# Altium footprint library cp-01.PcbLib: 47 footprints (part 3 of 3)
Each footprint in its own frame and in the unit in brackets; x right, y up, seen from the top. Pads: shape width x height; smd on the part's side, far side on the other; paste and mask are expansions set on the pad; w line width, h text height; cw(c..) or ccw(c..) is an arc to the next point about the centre after c.
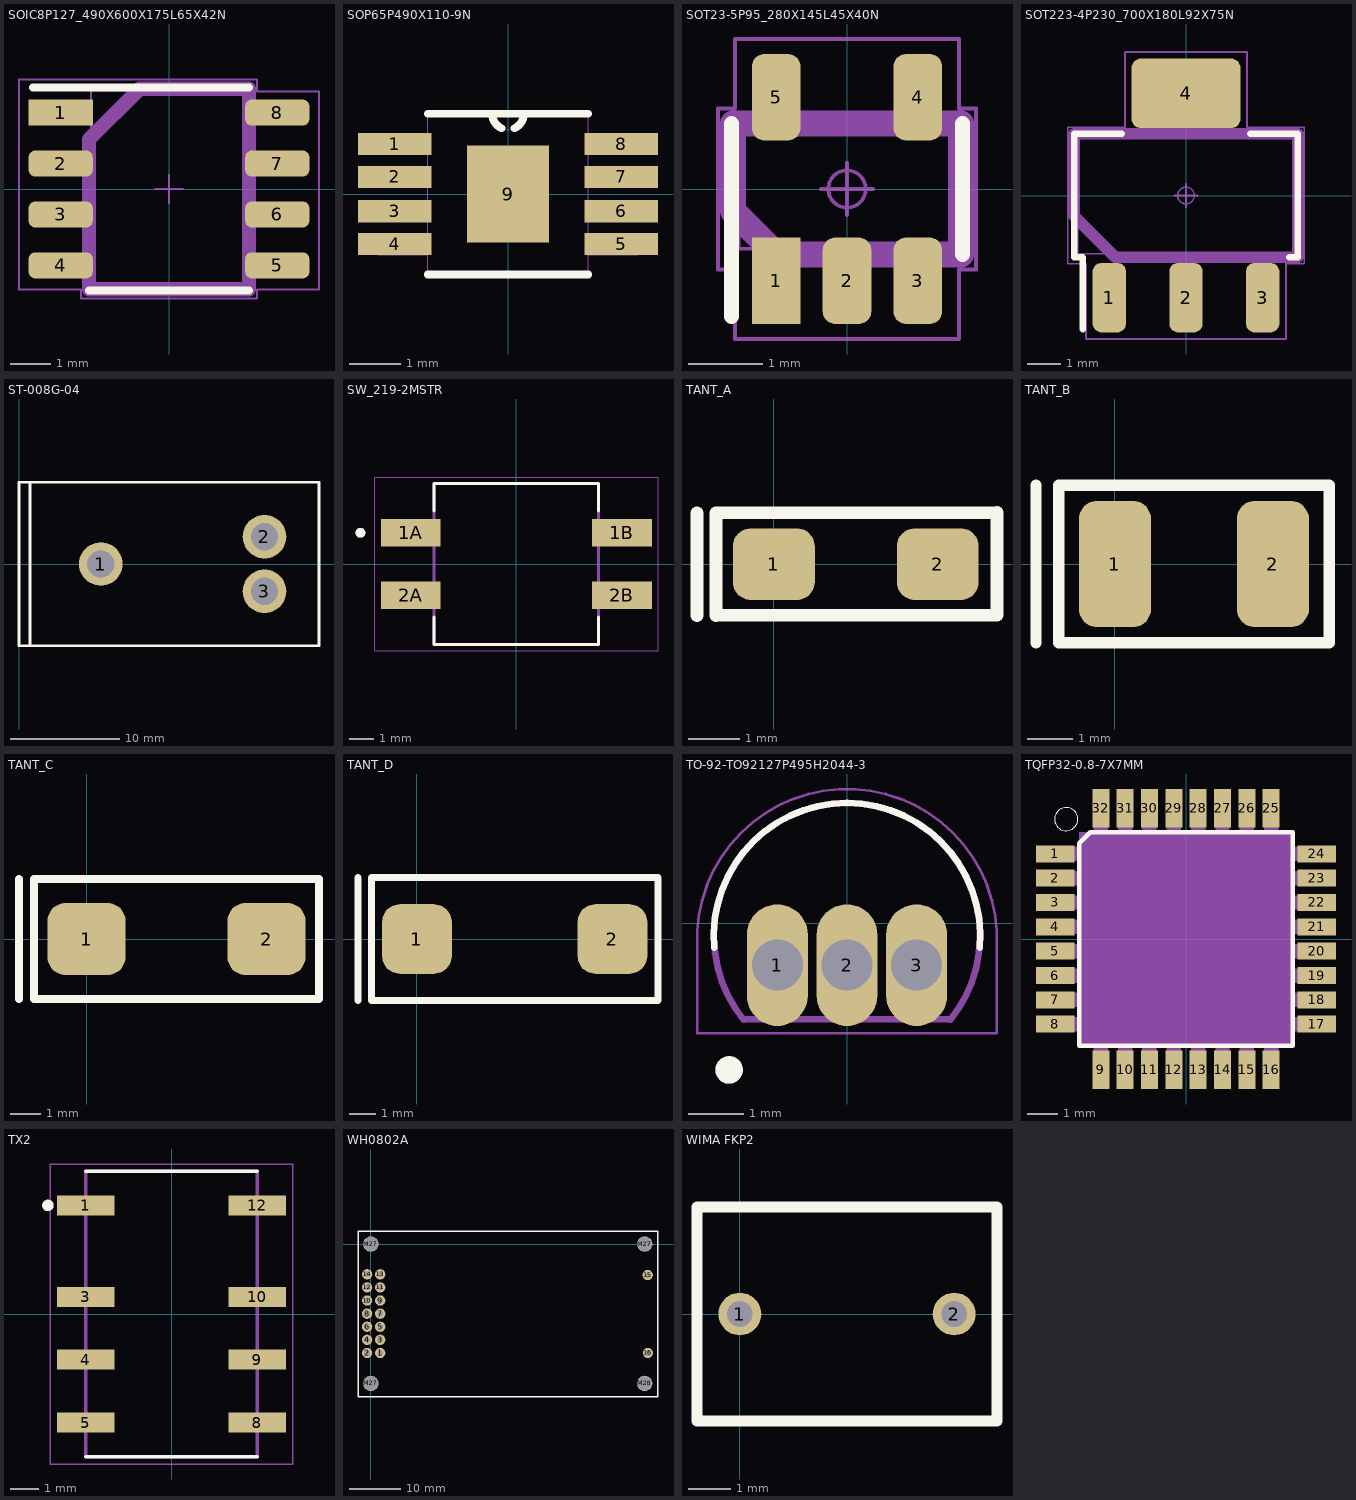
[diagram p2: the footprints below, top view; thin cyan lines are the x and y axes]

## SOIC8P127_490X600X175L65X42N [mm] "Small Outline IC (SOIC), 1.27 mm pitch; 8 pin, 4.905 mm L X 3.90 mm W X 1.75 mm H body"
height 1.75
pads (8):
  rect 1.6x0.65 smd: 1(-2.7,1.905)
  rrect49% 1.6x0.65 smd: 2(-2.7,0.635) 3(-2.7,-0.635) 4(-2.7,-1.905) 5(2.7,-1.905) 6(2.7,-0.635) 7(2.7,0.635) 8(2.7,1.905)
Top Overlay:
  lines w0.2: -3.39,2.53 -2,2.53 2,2.53 ; -2,-2.53 2,-2.53
Top Courtyard:
  lines w0.05: -0.35,0 0.35,0 ; 0,-0.35 0,0.35 ; -3.74,-2.5 -3.74,2.73 2.2,2.73 2.2,2.43 3.74,2.43 3.74,-2.5 2.2,-2.5 2.2,-2.73 -2.2,-2.73 -2.2,-2.5 -3.74,-2.5
Top Assembly:
  lines w0.35: -2,-2.5 -2,1.23 -0.73,2.5 2,2.5 2,-2.5 -2,-2.5
Top Component Outline:
  lines w0.05: -1.95,-2.452 -1.95,2.452 1.95,2.452 1.95,-2.452 -1.95,-2.452
Top Designator:
  text ".Designator" at 0,0 h1.2
Mechanical 25:
  lines w0.05: -3,-2.115 -2.165,-2.115 -2.165,-1.695 -3,-1.695 -3,-2.115 ; -3,-0.845 -2.165,-0.845 -2.165,-0.425 -3,-0.425 -3,-0.845 ; -3,0.425 -2.165,0.425 -2.165,0.845 -3,0.845 -3,0.425 ; -3,1.695 -2.165,1.695 -2.165,2.115 -3,2.115 -3,1.695 ; 2.165,-2.115 2.165,-1.695 3,-1.695 3,-2.115 2.165,-2.115 ; 2.165,-0.845 2.165,-0.425 3,-0.425 3,-0.845 2.165,-0.845 ; 2.165,0.425 2.165,0.845 3,0.845 3,0.425 2.165,0.425 ; 2.165,1.695 2.165,2.115 3,2.115 3,1.695 2.165,1.695
3D body "SOIC8P127_490X600X175L83X42.STEP": height 1.75, standoff 0, extent -3,-2.452 3,2.452

## SOP65P490X110-9N [mil]
pads (9):
  rect 56x17 smd: 1(-86,38) 2(-86,13) 3(-86,-13) 4(-86,-38) 5(86,-38) 6(86,-13) 7(86,13) 8(86,38)
  rect 62x74 smd: 9(0,0)
Top Overlay:
  lines w6: -61,-61 61,-61 ; -61,61 -12,61 ; -4.99,50 cw(c0.48,61.21) -12,60.99 ; 4.99,50 ccw(c-0.48,61.21) 12,60.99 ; 61,61 12,61 ; -12,61 12,61
Mechanical 13:
  lines w0: -12,61 ccw(c0,61) 12,61 ; -12,61 -61,61 -61,-61 61,-61 61,61 12,61 ; -12,61 12,61 ; -99,-46 -61,-46 -61,-31 -99,-31 -99,-46 ; -99,-20 -61,-20 -61,-5 -99,-5 -99,-20 ; -99,5 -61,5 -61,20 -99,20 -99,5 ; -99,31 -61,31 -61,46 -99,46 -99,31 ; 61,-46 99,-46 99,-31 61,-31 61,-46 ; 61,-20 99,-20 99,-5 61,-5 61,-20 ; 61,5 99,5 99,20 61,20 61,5 ; 61,31 99,31 99,46 61,46 61,31

## SOT23-5P95_280X145L45X40N [mm] "Small Outline Transistor (SOT23), 0.95 mm pitch; 5 pin, 2.90 mm L X 1.60 mm W X 1.45 mm H body"
height 1.45
pads (5):
  rect 0.65x1.16 smd: 1(-0.95,-1.23)
  rrect51% 0.65x1.16 smd: 2(0,-1.23) 3(0.95,-1.23) 4(0.95,1.23) 5(-0.95,1.23)
Top Overlay:
  lines w0.2: -1.55,-1.71 -1.55,-0.88 -1.55,0.88 ; 1.55,-0.88 1.55,0.88
Top Courtyard:
  circle w0.05: c0,0 r0.25
  lines w0.05: -0.35,0 0.35,0 ; 0,-0.35 0,0.35 ; -1.73,-1.08 -1.5,-1.08 -1.5,-2.01 1.5,-2.01 1.5,-1.08 1.73,-1.08 1.73,1.08 1.5,1.08 1.5,2.01 -1.5,2.01 -1.5,1.08 -1.73,1.08 -1.73,-1.08
Top Assembly:
  lines w0.35: -1.53,-0.293 -1.53,0.88 1.53,0.88 1.53,-0.88 -0.943,-0.88 -1.53,-0.293
Top Component Outline:
  lines w0.05: -1.45,-0.8 1.45,-0.8 1.45,0.8 -1.45,0.8 -1.45,-0.8
Top Designator:
  text ".Designator" at 0,0 h1.2
Mechanical 25:
  lines w0.05: -1.15,-1.4 -1.15,-0.95 -0.75,-0.95 -0.75,-1.4 -1.15,-1.4 ; -1.15,0.95 -1.15,1.4 -0.75,1.4 -0.75,0.95 -1.15,0.95 ; -0.2,-1.4 -0.2,-0.95 0.2,-0.95 0.2,-1.4 -0.2,-1.4 ; 0.75,-1.4 0.75,-0.95 1.15,-0.95 1.15,-1.4 0.75,-1.4 ; 0.75,0.95 0.75,1.4 1.15,1.4 1.15,0.95 0.75,0.95
3D body "SOT23-5P95_280X145L45X40.STEP": height 1.45, standoff 0, extent -1.45,-1.4 1.45,1.4

## SOT223-4P230_700X180L92X75N [mm] "Small Outline Transistor (SOT223), 2.30 mm pitch; 4 pin, 6.50 mm L X 3.50 mm W X 1.80 mm H body"
height 1.8
pads (4):
  rrect50% 1x2.08 smd: 1(-2.3,-3.065) 2(0,-3.065) 3(2.3,-3.065)
  rrect24% 3.26x2.08 smd: 4(0,3.065)
Top Overlay:
  lines w0.2: -3.1,-4.005 -3.1,-1.85 -3.35,-1.85 -3.35,1.85 -1.93,1.85 ; 1.93,1.85 3.35,1.85 3.35,-1.85 3.1,-1.85
Top Courtyard:
  circle w0.05: c0,0 r0.25
  lines w0.05: -0.35,0 0.35,0 ; 0,-0.35 0,0.35 ; -3.55,-2.05 -3.55,2.05 -1.83,2.05 -1.83,4.305 1.83,4.305 1.83,2.05 3.55,2.05 3.55,-2.05 3,-2.05 3,-4.305 -3,-4.305 -3,-2.05 -3.55,-2.05
Top Assembly:
  lines w0.35: -3.35,-0.617 -2.117,-1.85 3.35,-1.85 3.35,1.85 -3.35,1.85 -3.35,-0.617
Top Component Outline:
  lines w0.05: -3.25,-1.75 -3.25,1.75 3.25,1.75 3.25,-1.75 -3.25,-1.75
Top Designator:
  text ".Designator" at 0,0 h1.2
Mechanical 25:
  lines w0.05: -2.675,-3.5 -1.925,-3.5 -1.925,-2.575 -2.675,-2.575 -2.675,-3.5 ; -1.5,2.575 1.5,2.575 1.5,3.5 -1.5,3.5 -1.5,2.575 ; -0.375,-3.5 0.375,-3.5 0.375,-2.575 -0.375,-2.575 -0.375,-3.5 ; 1.925,-3.5 2.675,-3.5 2.675,-2.575 1.925,-2.575 1.925,-3.5
3D body "SOT223-4P230_700X180L92X75.STEP": height 1.8, standoff 0, extent -3.25,-3.5 3.25,3.5

## ST-008G-04 [mm]
pads (3):
  round 4 hole 2.5: 1(7.5,0) 2(22.5,2.5) 3(22.5,-2.5)
Top Overlay:
  lines w0.254: 1,-7.5 1,7.5 ; 0,-7.5 27.5,-7.5 27.5,7.5 0,7.5 0,0 0,-7.5

## SW_219-2MSTR [mm]
pads (4):
  rect 2.44x1.13 smd: 1A(-4.3,1.27) 1B(4.3,1.27) 2A(-4.3,-1.27) 2B(4.3,-1.27)
Top Overlay:
  circle w0.2: c-6.35,1.27 r0.1
  lines w0.127: -3.35,-2.155 -3.35,-3.275 3.35,-3.275 3.35,-2.155 ; -3.35,2.155 -3.35,3.275 3.35,3.275 3.35,2.155
Mechanical 13:
  circle w0.2: c-6.35,1.27 r0.1
  lines w0.127: -3.35,-3.275 3.35,-3.275 3.35,3.275 -3.35,3.275 -3.35,-3.275
Mechanical 15:
  lines w0.05: -5.77,-3.525 -5.77,3.525 5.77,3.525 5.77,-3.525 -5.77,-3.525
3D body "step_temp.STEP": height 4.58, standoff 0, extent -4.955,-3.275 4.955,3.275

## TANT_A [mm]
pads (2):
  rrect50% 1.6x1.4 smd: 1(0,0) 2(3.2,0)
Top Overlay:
  lines w0.254: -1.5,-1 -1.5,1 ; -1.125,-1 4.356,-0.992 4.356,1.008 -1.125,1 -1.125,-1
3D body "tant a.STEP": height 1.8, standoff 0, extent 0.075,-0.85 3.275,0.75

## TANT_B [mm]
pads (2):
  rrect50% 1.6x2.8 smd: 1(0,0) 2(3.5,0)
Top Overlay:
  lines w0.254: -1.75,-1.75 -1.75,1.75 ; -1.25,-1.75 -1.25,1.75 4.75,1.75 4.75,-1.75 -1.25,-1.75
3D body "tant b.STEP": height 2.1, standoff 0, extent 0,-1.3 3.5,1.5

## TANT_C [mm]
pads (2):
  rrect50% 2.6x2.4 smd: 1(0,0) 2(6,0)
Top Overlay:
  lines w0.254: -2.25,-2 -2.25,2 ; -1.75,-2 7.75,-2 7.75,2 -1.75,2 -1.75,-2
3D body "tant c.STEP": height 2.8, standoff 0, extent 0,-1.6 6,1.6

## TANT_D [mm]
pads (2):
  rrect50% 2.6x2.6 smd: 1(0,0) 2(7.3,0)
Top Overlay:
  lines w0.254: -2.2,-2.3 -2.2,2.3 ; -1.7,-2.3 -1.7,2.3 9,2.3 9,-2.3 -1.7,-2.3
3D body "tant d.STEP": height 3.1, standoff 0, extent -0.05,-2.2 7.25,2.1

## TO-92-TO92127P495H2044-3 [mm]
pads (3):
  oval 1.11x2.22 hole 0.93: 1(-1.27,-0.76) 2(0,-0.76) 3(1.27,-0.76)
Top Overlay:
  circle w0.25: c-2.15,-2.67 r0.125
  lines w0.12: -2.421,-0.444 cw(c0,-0.232) 2.421,-0.444
Mechanical 13:
  circle w0.25: c-2.15,-2.67 r0.125
  lines w0.12: -1.893,-1.748 1.892,-1.748 ; -1.886,-1.756 cw(c-0.001,-0.229) 1.885,-1.756
Mechanical 15:
  lines w0.05: -2.731,-0.426 cw(c0,-0.283) 2.731,-0.426 ; -2.73,-0.45 -2.73,-2 2.73,-2 2.73,-0.45
3D body "DS18B20--3DModel-STEP-56544.STEP": height 19.45, standoff -1, extent -2.26,-2.02 2.31,1.6

## TQFP32-0.8-7X7MM [mil]
pads (32):
  rect 50x22 smd: 1(-169,110.24) 2(-169,78.74) 3(-169,47.24) 4(-169,15.75) 5(-169,-15.75) 6(-169,-47.24) 7(-169,-78.74) 8(-169,-110.24) 17(169,-110.24) 18(169,-78.74) 19(169,-47.24) 20(169,-15.75) 21(169,15.75) 22(169,47.24) 23(169,78.74) 24(169,110.24)
  rect 22x50 smd: 9(-110.24,-169) 10(-78.74,-169) 11(-47.24,-169) 12(-15.75,-169) 13(15.75,-169) 14(47.24,-169) 15(78.74,-169) 16(110.24,-169) 25(110.24,169) 26(78.74,169) 27(47.24,169) 28(15.75,169) 29(-15.75,169) 30(-47.24,169) 31(-78.74,169) 32(-110.24,169)
Top Overlay:
  circle w0: c-155,155 r15
  lines w6: -137.99,-137.99 -137.99,124.02 -124.02,137.99 137.99,137.99 137.99,-137.99 -137.99,-137.99
Mechanical 13:
  region: -101.24,140.2 -119.4,140.2 -119.4,179 -101.24,179
  region: -69.74,140.07 -87.78,140.07 -87.78,179 -69.74,179
  region: -38.24,140.07 -56.27,140.07 -56.27,179 -38.24,179
  region: -6.75,140.19 -24.78,140.19 -24.78,179 -6.75,179
  region: 24.75,140.2 6.76,140.2 6.76,179 24.75,179
  region: 56.24,140.21 38.3,140.21 38.3,179 56.24,179
  region: 87.74,140.06 69.77,140.06 69.77,179 87.74,179
  region: 119.24,140.11 101.31,140.11 101.31,179 119.24,179
  region: 179,101.34 140.14,101.34 140.14,119.24 179,119.24
  region: 179,69.8 140.12,69.8 140.12,87.74 179,87.74
  region: 179,38.3 140.21,38.3 140.21,56.24 179,56.24
  region: 179,6.75 140.01,6.75 140.01,24.75 179,24.75
  region: 179,-24.75 140.02,-24.75 140.02,-6.75 179,-6.75
  region: 179,-56.29 140.12,-56.29 140.12,-38.24 179,-38.24
  region: 179,-87.86 140.19,-87.86 140.19,-69.74 179,-69.74
  region: 179,-119.46 140.26,-119.46 140.26,-101.24 179,-101.24
  region: 119.24,-179.13 101.31,-179.13 101.31,-140 119.24,-140
  region: 87.74,-179.22 69.82,-179.22 69.82,-140 87.74,-140
  region: 56.24,-179.11 38.27,-179.11 38.27,-140 56.24,-140
  region: 24.75,-179.26 6.76,-179.26 6.76,-140 24.75,-140
  region: -6.75,-179.31 -24.79,-179.31 -24.79,-140 -6.75,-140
  region: -38.24,-179.22 -56.31,-179.22 -56.31,-140 -38.24,-140
  region: -69.74,-179.36 -87.92,-179.36 -87.92,-140 -69.74,-140
  region: -101.24,-179.09 -119.3,-179.09 -119.3,-140 -101.24,-140
  region: -140,-119.44 -179.31,-119.44 -179.31,-101.24 -140,-101.24
  region: -140,-87.88 -179.29,-87.88 -179.29,-69.74 -140,-69.74
  region: -140,-56.3 -179.18,-56.3 -179.18,-38.24 -140,-38.24
  region: -140,-24.77 -179.18,-24.77 -179.18,-6.75 -140,-6.75
  region: -140,6.76 -179.3,6.76 -179.3,24.75 -140,24.75
  region: -140,38.27 -179.14,38.27 -179.14,56.24 -140,56.24
  region: -140,69.75 -179.02,69.75 -179.02,87.74 -140,87.74
  region: -140,101.41 -179.31,101.41 -179.31,119.24 -140,119.24
Mechanical 15:
  region: 137.99,-138.05 -138.05,-138.05 -138.05,137.99 137.99,137.99
3D body "ATMEGA8A-AU.STEP": height 47.44, standoff 0.2, extent -177.16,-177.16 177.16,177.16

## TX2 [mm]
pads (8):
  rect 2x0.7 smd: 1(-3,3.8) 3(-3,0.6) 4(-3,-1.6) 5(-3,-3.8) 8(3,-3.8) 9(3,-1.6) 10(3,0.6) 12(3,3.8)
Top Overlay:
  circle w0.2: c-4.327,3.8 r0.1
  lines w0.127: -3,-5 3,-5 ; -3,5 3,5
Mechanical 13:
  lines w0.127: -3,-5 -3,5 3,5 3,-5 -3,-5
Mechanical 15:
  lines w0.05: -4.25,-5.25 -4.25,5.25 4.25,5.25 4.25,-5.25 -4.25,-5.25
3D body "2-1462037-3.stp": height 5.65, standoff 0, extent -3.758,-5 3.758,5

## WH0802A [mm]
pads (20):
  round 2 hole 1.1: 1(1.8,-21.1) 2(-0.74,-21.1) 3(1.8,-18.56) 4(-0.74,-18.56) 5(1.8,-16.02) 6(-0.74,-16.02) 7(1.8,-13.48) 8(-0.74,-13.48) 9(1.8,-10.94) 10(-0.74,-10.94) 11(1.8,-8.4) 12(-0.74,-8.4) 13(1.8,-5.86) 14(-0.74,-5.86) 15(53.6,-6) 16(53.65,-21.1)
  round 3 hole 2.7: M27(0,-27) M27(0,0) M27(53,0) M28(53,-27)
Top Overlay:
  lines w0.254: -2.5,-29.6 55.6,-29.6 55.6,2.5 -2.5,2.5 -2.5,-29.6
3D body "User Library-WH0802A.SLDPRT": height 21.4, standoff 7.9, extent -2.4,-29.6 55.6,2.4

## WIMA FKP2 [mm]
pads (2):
  round 1 hole 0.6: 1(0,0) 2(5,0)
Top Overlay:
  lines w0.254: -1,-2.5 -1,2.5 6,2.5 6,-2.5 -1,-2.5
3D body "pfr5222j63j11l4bulk.stp": height 6.25, standoff -4.75, extent -1.1,-2.204 6.1,2.3